# Altium integrated library KP-1608SGC.IntLib: 1 symbol
Pins are listed as number, name and electrical type; pins without a type are passive.

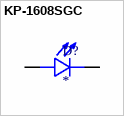
[diagram p0: symbol KP-1608SGC]

## KP-1608SGC
designator D?
KP-1608SGC Green LED, 568 nm 1608 (0603), Rectangle Lens SMD package; MF: Kingbright; SnapEDA_Link: https://www.snapeda.com/parts/KP-1608SGC/Kingbright/view-part/?ref=snap; Package: 0603 Kingbright; Value: *; MP: KP-1608SGC; Check_prices: https://www.snapeda.com/parts/KP-1608SGC/Kingbright/view-part/?ref=eda
footprint LED_KP-1608SGC
pins: A, C